# Altium footprint library 2N7002KW.PcbLib: 3 footprints
Each footprint in its own frame and in the unit in brackets; x right, y up, seen from the top. Pads: shape width x height; smd on the part's side, far side on the other; paste and mask are expansions set on the pad; w line width, h text height; cw(c..) or ccw(c..) is an arc to the next point about the centre after c.
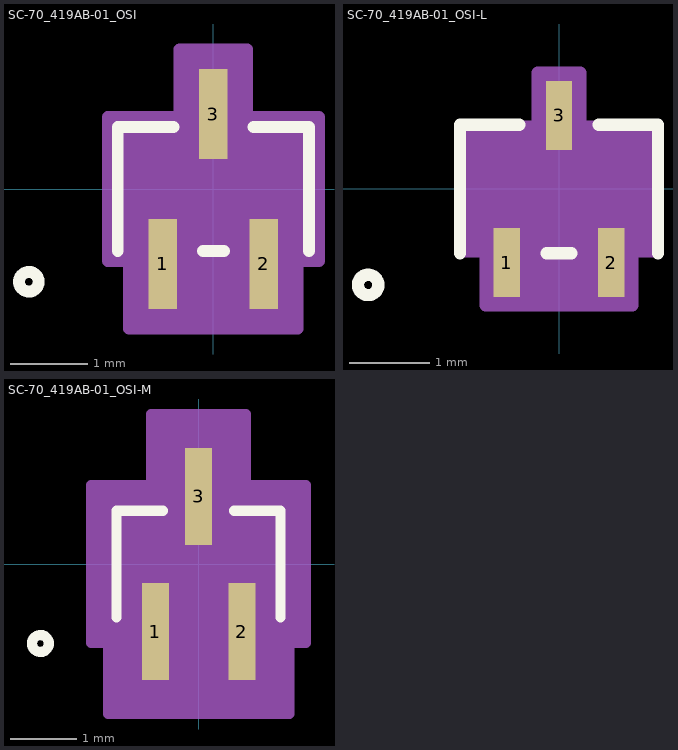
[diagram p0: the footprints below, top view; thin cyan lines are the x and y axes]

## SC-70_419AB-01_OSI [mil]
pads (3):
  rect 14.36x45.56 smd paste+0 mask+0: 1(-25.59,-38) 2(25.59,-38) 3(0,38)
Top Overlay:
  circle w6: c-93.5,-47 r5
  lines w6: -48.5,-31.5 -48.5,31.5 -20.28,31.5 ; -5.31,-31.5 5.31,-31.5 ; 20.28,31.5 48.5,31.5 48.5,-31.5
  text ".Designator" at -137.5,-25 h50
Mechanical 13:
  circle w1: c-33.5,-16.5 r5
  lines w1: -43.5,-26.5 43.5,-26.5 43.5,26.5 -43.5,26.5 -43.5,-26.5 ; -31.59,-47 -31.59,-26.5 -19.59,-26.5 -19.59,-47 -31.59,-47 ; -6,26.5 6,26.5 6,47 -6,47 -6,26.5 ; 19.59,-47 19.59,-26.5 31.59,-26.5 31.59,-47 19.59,-47
  text ".Designator" at -137.5,-25 h50
Mechanical 15:
  region: -53.5,-36.5 -53.5,36.5 -17.18,36.5 -17.18,70.78 17.18,70.78 17.18,36.5 53.5,36.5 53.5,-36.5 42.77,-36.5 42.77,-70.78 -42.77,-70.78 -42.77,-36.5
  region: 43.5,-26.5 -43.5,-26.5 -43.5,26.5 43.5,26.5
  lines w6: -53.5,-36.5 -53.5,36.5 -17.18,36.5 -17.18,70.78 17.18,70.78 17.18,36.5 53.5,36.5 53.5,-36.5 42.77,-36.5 42.77,-70.78 -42.77,-70.78 -42.77,-36.5 -53.5,-36.5
3D body "SC-70_419AB-01_OSI.step": height 43.11, standoff 0, extent -43.5,-47.01 43.5,47.01

## SC-70_419AB-01_OSI-L [mm]
pads (3):
  rect 0.325x0.857 smd paste+0 mask+0: 1(-0.65,-0.915) 2(0.65,-0.915) 3(0,0.915)
Top Overlay:
  circle w0.152: c-2.375,-1.194 r0.127
  lines w0.152: -1.232,-0.8 -1.232,0.8 -0.495,0.8 ; -0.155,-0.8 0.155,-0.8 ; 0.495,0.8 1.232,0.8 1.232,-0.8
  text ".Designator" at -3.492,-0.635 h1.27
Mechanical 13:
  circle w0.025: c-0.851,-0.419 r0.127
  lines w0.025: -1.105,-0.673 1.105,-0.673 1.105,0.673 -1.105,0.673 -1.105,-0.673 ; -0.802,-1.194 -0.802,-0.673 -0.498,-0.673 -0.498,-1.194 -0.802,-1.194 ; -0.152,0.673 0.152,0.673 0.152,1.194 -0.152,1.194 -0.152,0.673 ; 0.498,-1.194 0.498,-0.673 0.802,-0.673 0.802,-1.194 0.498,-1.194
  text ".Designator" at -3.492,-0.635 h1.27
Mechanical 15:
  region: -1.206,-0.775 -1.206,0.775 -0.264,0.775 -0.264,1.445 0.264,1.445 0.264,0.775 1.206,0.775 1.206,-0.775 0.914,-0.775 0.914,-1.445 -0.914,-1.445 -0.914,-0.775
  region: 1.105,-0.673 -1.105,-0.673 -1.105,0.673 1.105,0.673
  lines w0.152: -1.206,-0.775 -1.206,0.775 -0.264,0.775 -0.264,1.445 0.264,1.445 0.264,0.775 1.206,0.775 1.206,-0.775 0.914,-0.775 0.914,-1.445 -0.914,-1.445 -0.914,-0.775 -1.206,-0.775
3D body "SC-70_419AB-01_OSI.step": height 1.09, standoff 0, extent -1.105,-1.194 1.105,1.194

## SC-70_419AB-01_OSI-M [mm]
pads (3):
  rect 0.405x1.457 smd paste+0 mask+0: 1(-0.65,-1.015) 2(0.65,-1.015) 3(0,1.015)
Top Overlay:
  circle w0.152: c-2.375,-1.194 r0.127
  lines w0.152: -1.232,-0.8 -1.232,0.8 -0.535,0.8 ; 0.535,0.8 1.232,0.8 1.232,-0.8
  text ".Designator" at -3.492,-0.635 h1.27
Mechanical 13:
  circle w0.025: c-0.851,-0.419 r0.127
  lines w0.025: -1.105,-0.673 1.105,-0.673 1.105,0.673 -1.105,0.673 -1.105,-0.673 ; -0.802,-1.194 -0.802,-0.673 -0.498,-0.673 -0.498,-1.194 -0.802,-1.194 ; -0.152,0.673 0.152,0.673 0.152,1.194 -0.152,1.194 -0.152,0.673 ; 0.498,-1.194 0.498,-0.673 0.802,-0.673 0.802,-1.194 0.498,-1.194
  text ".Designator" at -3.492,-0.635 h1.27
Mechanical 15:
  region: -1.613,-1.181 -1.613,1.181 -0.71,1.181 -0.71,2.252 0.71,2.252 0.71,1.181 1.613,1.181 1.613,-1.181 1.36,-1.181 1.36,-2.252 -1.36,-2.252 -1.36,-1.181
  region: 1.105,-0.673 -1.105,-0.673 -1.105,0.673 1.105,0.673
  lines w0.152: -1.613,-1.181 -1.613,1.181 -0.71,1.181 -0.71,2.252 0.71,2.252 0.71,1.181 1.613,1.181 1.613,-1.181 1.36,-1.181 1.36,-2.252 -1.36,-2.252 -1.36,-1.181 -1.613,-1.181
3D body "SC-70_419AB-01_OSI.step": height 1.09, standoff 0, extent -1.105,-1.194 1.105,1.194